# EAGLE library part POLYVARICON6 (library madhu)
Dual ganged polyvaricon capacitor Duplex 443BF AM/FM270P+270P/20P+20P <https://www.amazon.com/dp/B0CKMNPVHH?ref=ppx_yo2ov_dt_b_fed_asin_title>
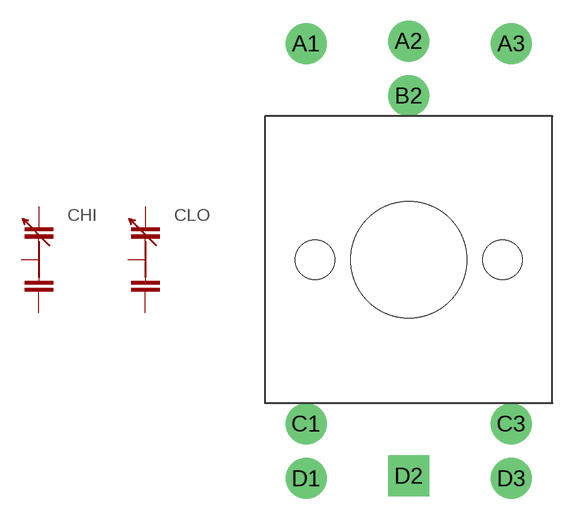
[diagram p49: symbol with the pads of POLYVARICON6; footprint POLYVARICON6]

Designator prefix C; gates HI=CAP-VAR-GANGED LO=CAP-VAR-GANGED

## POLYVARICON6  [POLYVARICON6]
A1  LO:A  pas
A2  LO:B  pas
A3  LO:C  pas
B2  HI:B  pas
C1  HI:A  pas
C3  HI:C  pas

## Footprint POLYVARICON6 (pad centres in mm)
21mm Polyvaricon Capacitor grid 1.0 mm, outline 21 x 21 mm Body on board top, dial on bottom.
drill 2: A1 -7.5,15.81; A2 0,16; A3 7.5,15.81; B2 0,12; C1 -7.5,-12; C3 7.5,-12; D1 -7.5,-16; D3 7.5,-16
drill 2 square: D2 0,-15.81
hole 8.5 at 0,0
hole 2.9 at -6.85,0
hole 2.9 at 6.85,0